# Altium footprint library VZH470M1VTR-0606L_C473421.PcbLib: 1 footprints
Each footprint in its own frame and in the unit in brackets; x right, y up, seen from the top. Pads: shape width x height; smd on the part's side, far side on the other; paste and mask are expansions set on the pad; w line width, h text height; cw(c..) or ccw(c..) is an arc to the next point about the centre after c.
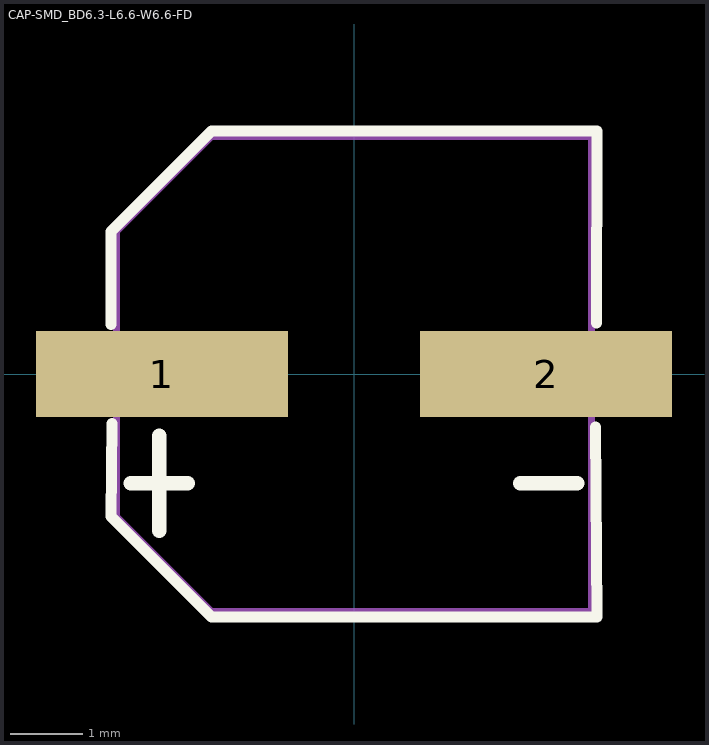
[diagram p0: the footprint, top view; thin cyan lines are the x and y axes]

## CAP-SMD_BD6.3-L6.6-W6.6-FD [mm] "Lelon VZH470M1VTR-0606L C473421 47uF 35V SMD"
height 5.7
pads (2):
  rect 3.5x1.2 smd: 1(-2.67,0) 2(2.67,0)
Top Overlay:
  lines w0.152: -3.376,0.686 -3.376,1.98 -1.98,3.376 3.376,3.376 3.369,0.708 ; -3.362,-0.686 -3.376,-1.981 -1.981,-3.376 3.376,-3.376 3.356,-0.739
  lines w0.198: -3.102,-1.518 -2.31,-1.518 ; -2.706,-2.178 -2.706,-0.858 ; 2.31,-1.518 3.102,-1.518
Mechanical 6:
  lines w0.1: -3.3,-1.98 -1.98,-3.3 3.3,-3.3 3.3,3.3 -1.98,3.3 -3.3,1.98 -3.3,-1.98